# Altium schematic symbol library CL05A105KO5NNNC.SchLib: 1 symbol
Pins are listed as number, name and electrical type; pins without a type are passive.

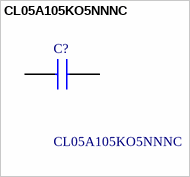
[diagram p0: symbol CL05A105KO5NNNC]

## CL05A105KO5NNNC
designator C?
Samsung Electro-Mechanics 0402 (1005M) 1uF Multilayer Ceramic Capacitor MLCC 16V dc +/-10% SMD CL05A105KO5NNNC; Geometry.Height: 0.55mm; Manufacturer_Name: SAMSUNG; Manufacturer_Part_Number: CL05A105KO5NNNC; Mouser Part Number: 187-CL05A105KO5NNNC; Mouser Price/Stock: https://www.mouser.co.uk/ProductDetail/Samsung-Electro-Mechanics/CL05A105KO5NNNC?qs=349EhDEZ59pCm%252BzVtNxq%2FQ%3D%3D; Arrow Part Number: CL05A105KO5NNNC; Arrow Price/Stock: https://www.arrow.com/en/products/cl05a105ko5nnnc/samsung-electro-mechanics?utm_currency=USD&region=nac; Datasheet Link: https://datasheet.lcsc.com/szlcsc/Samsung-Electro-Mechanics-CL05A105KO5NNNC_C29266.pdf
footprint CAPC1005X55N
pins: 1, 2